# Altium footprint library Antenna$.PcbLib: 34 footprints (part 3 of 3)
Each footprint in its own frame and in the unit in brackets; x right, y up, seen from the top. Pads: shape width x height; smd on the part's side, far side on the other; paste and mask are expansions set on the pad; w line width, h text height; cw(c..) or ccw(c..) is an arc to the next point about the centre after c.
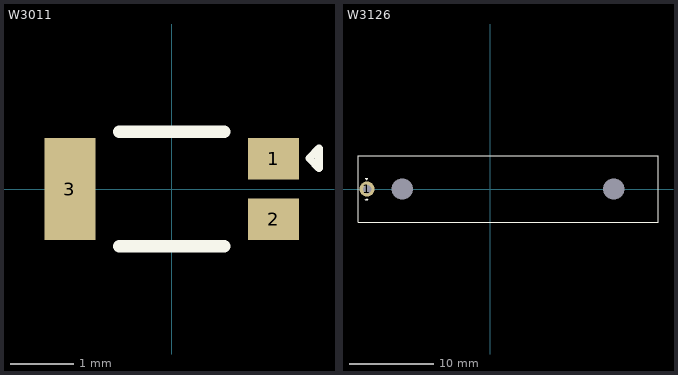
[diagram p2: the footprints below, top view; thin cyan lines are the x and y axes]

## W3011 [mm]
pads (3):
  rect 0.8x0.65 smd: 1(1.6,0.475) 2(1.6,-0.475)
  rect 0.8x1.6 smd: 3(-1.6,0)
Top Overlay:
  lines w0.127: 2.159,0.483 2.311,0.635 2.311,0.33 2.159,0.483
  lines w0.2: -0.825,-0.9 0.825,-0.9 ; -0.825,0.9 0.825,0.9
3D body "Ant_PulseLarsen_Antennas_W3011A_eec.STEP": height 0.25, standoff 0, extent -2.1,-1 2.1,1
3D body "Ant_PulseLarsen_Antennas_W3011A_eec.STEP": height 1.3, standoff 0, extent -1.6,-0.801 1.6,0.8

## W3126 [mm]
pads (3):
  round 1.8 hole 1: 1(-14.575,0)
  round 0 hole 2.5 unplated: 2(-10.425,0) 3(14.575,0)
Top Overlay:
  lines w0.127: -15.646,-3.937 -15.646,3.954 19.812,3.954 19.812,-3.937 -15.646,-3.937 ; -14.783,-1.27 -14.63,-1.118 -14.478,-1.27 -14.783,-1.27 ; -14.783,1.27 -14.63,1.118 -14.478,1.27 -14.783,1.27
3D body "W3126.STEP": height 8.89, standoff -1.4, extent -15.596,-3.894 19.754,3.894